# Altium schematic symbol library A3000_PSU.SchLib: 3 symbols
Pins are listed as number, name and electrical type; pins without a type are passive.

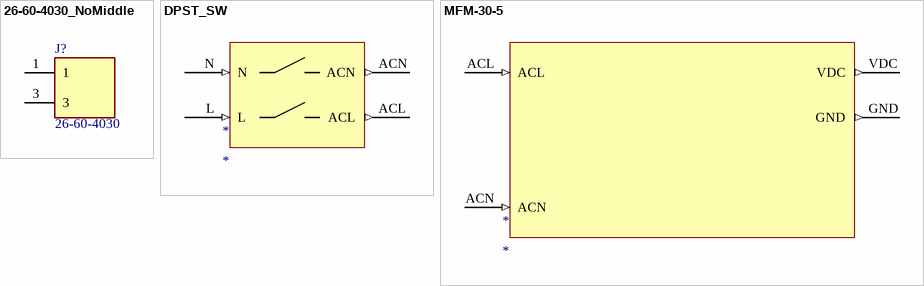
[diagram p0: symbols 26-60-4030_NoMiddle to MFM-30-5]

## 26-60-4030_NoMiddle
designator J?, comment 26-60-4030
Connector; Manufacturer_Name: Molex; Datasheet Link: https://componentsearchengine.com/Datasheets/2/26-60-4030.pdf; Height: 15.36mm; Manufacturer_Part_Number: 26-60-4030; Mouser Part Number: 538-26-60-4030; Mouser Price/Stock: https://www.mouser.co.uk/ProductDetail/Molex/26-60-4030?qs=jcz9%252BeLWjlgPf3deDPDuUA%3D%3D
footprint SHDR3W155P0X396_1X3_NoMiddle
pins: 1, 3

## DPST_SW
designator *
footprint SWITCH_RS_180-84
pins: ACL (out), ACN (out), L (in), N (in)

## MFM-30-5
designator *
footprint MFM-30-5
pins: ACL (in), ACN (in), GND (out), VDC (out)